# Altium footprint library Header2.PcbLib: 108 footprints (part 3 of 7)
Each footprint in its own frame and in the unit in brackets; x right, y up, seen from the top. Pads: shape width x height; smd on the part's side, far side on the other; paste and mask are expansions set on the pad; w line width, h text height; cw(c..) or ccw(c..) is an arc to the next point about the centre after c.
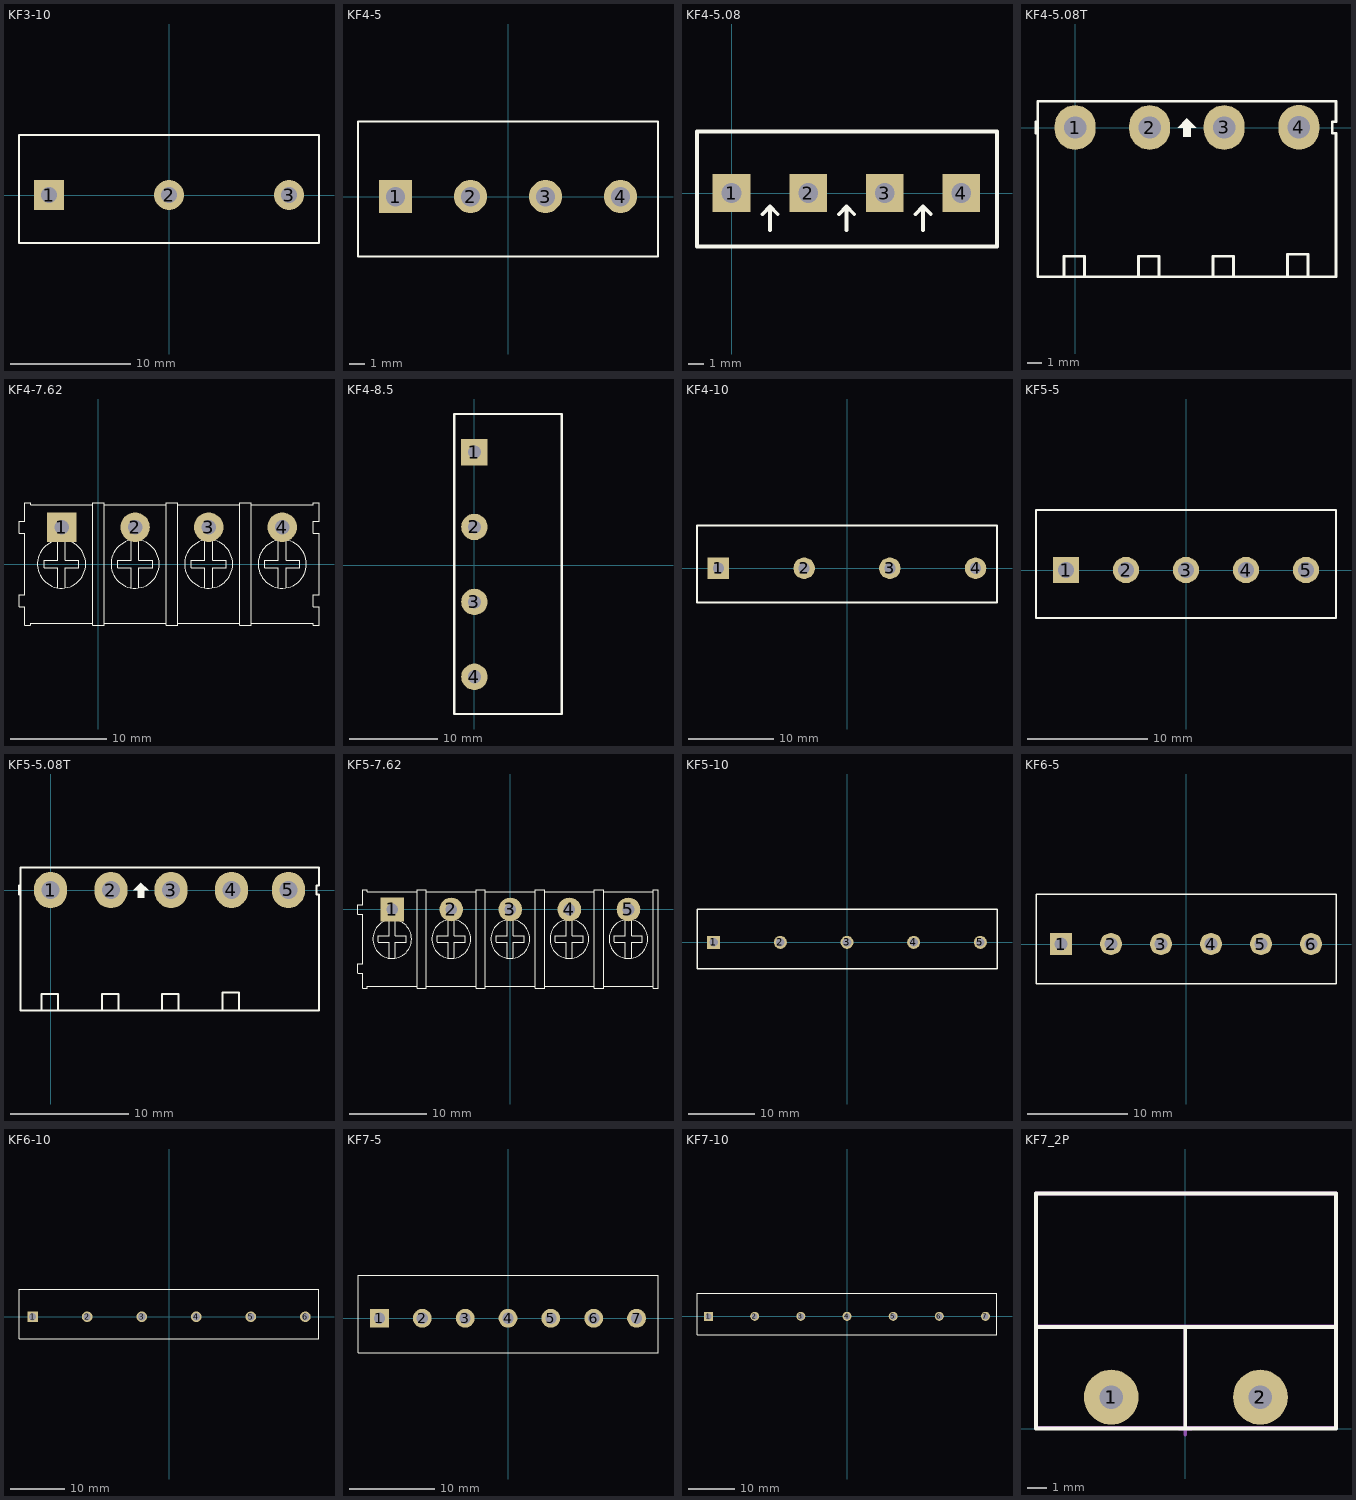
[diagram p2: the footprints below, top view; thin cyan lines are the x and y axes]

## KF3-10 [mm] "Serie 1368 - 10.00 mm _ 3 pins"
height 13
pads (3):
  rect 2.5x2.5 hole 1.3: 1(-10,0)
  round 2.5 hole 1.3: 2(0,0) 3(10,0)
Top Overlay:
  lines w0.2: -12.5,-4 12.5,-4 12.5,5 -12.5,5 -12.5,-4
3D body "691136810003.stp": height 13.1, standoff -3.9, extent -12.5,-4 12.5,5

## KF4-5 [mm] "Serie 1337 - 5.00 mm_4 pins"
height 13
pads (4):
  rect 2.2x2.2 hole 1.3: 1(-7.5,0)
  round 2.2 hole 1.3: 2(-2.5,0) 3(2.5,0) 4(7.5,0)
Top Overlay:
  lines w0.127: -10,-4 -10,5 10,5 10,-4 -10,-4
3D body "691133710004.stp": height 13, standoff -3.6, extent -10,-4 10,5

## KF4-5.08 [mm]
pads (4):
  rect 2.5x2.5 hole 1.3: 1(0,0) 2(5.08,0) 3(10.147,0) 4(15.215,0)
Top Overlay:
  lines w0.254: 2.045,-1.41 2.553,-0.902 ; 2.553,-2.464 2.553,-0.902 ; 3.061,-1.41 2.553,-0.902 ; 7.112,-1.41 7.62,-0.902 ; 7.62,-2.464 7.62,-0.902 ; 8.128,-1.41 7.62,-0.902 ; 12.179,-1.41 12.687,-0.902 ; 12.687,-2.464 12.687,-0.902 ; 13.195,-1.41 12.687,-0.902 ; -2.286,-3.531 17.577,-3.531 17.577,4.064 -2.286,4.064 -2.286,-3.531
3D body "SW3DPS-HDR1x4-MED-GREEN.STEP": height 10, standoff -4, extent -2.362,-3.429 17.638,4.071

## KF4-5.08T [mil] "Header 4, 4 pin, hight 300mil, Pin to Pin 200, Colour Green"
height 300
pads (4):
  oval 110x120 hole 60: 1(0,0) 2(200,0) 3(400.06,0.06) 4(600.39,0.39)
Top Overlay:
  region: 300,25 275,0 290,0 290,-25 310,-25 310,0 325,0
  lines w7: -105,-15 -105,15 ; -30,-400 -30,-345 25,-345 25,-400 ; 170,-400 170,-345 225,-345 225,-400 ; 370,-400 370,-345 425,-345 425,-400 ; 570,-395 570,-340 625,-340 625,-395 ; -100,-400 -100,70 700,70 700,15 690,15 690,-15 700,-15 700,-400 -100,-400
3D body "User Library-BigHeader 5EHDR_1P.step": height 334.11, standoff -156.88, extent -86.85,-406.22 110,66.22
3D body "User Library-BigHeader 5EHDR_1P.step": height 334.11, standoff -156.88, extent 300,-406.22 496.85,66.22
3D body "User Library-BigHeader 5EHDR_1P.step": height 334.11, standoff -156.88, extent 493.15,-406.22 690,66.22
3D body "User Library-BigHeader 5EHDR_1P.step": height 334.11, standoff -156.88, extent 110,-406.22 306.85,66.22

## KF4-7.62 [mil]
pads (4):
  rect 120x120 hole 59.06 unplated: 1(-150,150)
  round 120 hole 59.06 unplated: 2(150,150) 3(450,150) 4(750,150)
Top Overlay:
  circle w4: c150,0 r98.43
  circle w4: c-150,0 r98.43
  circle w4: c450,0 r98.43
  circle w4: c750,0 r98.43
  lines w4: -323.62,-173.62 -323.62,-126.38 -300,-126.38 -300,126.38 -323.62,126.38 -323.62,173.62 ; -323,-173.62 -300,-173.62 -300,-250 -277,-250 ; -323,173.62 -300,173.62 -300,250 -277,250 ; -276.38,-250 -276.38,-241 -23.62,-241 -23.62,-250 23.62,-250 23.62,-241 276.38,-241 276.38,-250 323.62,-250 323.62,-241 576.38,-241 576.38,-250 623.62,-250 623.62,-241 876.38,-241 ; -276.38,250 -276.38,241 -23.62,241 -23.62,250 23.62,250 23.62,241 276.38,241 276.38,250 323.62,250 323.62,241 576.38,241 576.38,250 623.62,250 623.62,241 876.38,241 ; -221,-15.75 -165.75,-15.75 ; -221,-15 -221,16 ; -221,15.75 -165.75,15.75 ; -165.75,-97 -165.75,-16 ; -165.75,16 -165.75,97 ; -134.25,-97 -134.25,-16 ; -134.25,-15.75 -79,-15.75 ; -134.25,15.75 -79,15.75 ; -134.25,16 -134.25,97 ; -79,-15 -79,16 ; -23.62,-244 -23.62,245 ; 23.62,-244 23.62,245 ; 79,-15.75 134.25,-15.75 ; 79,-15 79,16 ; 79,15.75 134.25,15.75 ; 134.25,-97 134.25,-16 ; 134.25,16 134.25,97 ; 165.75,-97 165.75,-16 ; 165.75,-15.75 221,-15.75 ; 165.75,15.75 221,15.75 ; 165.75,16 165.75,97 ; 221,-15 221,16 ; 276.38,-244 276.38,245 ; 276.38,-173.62 276.38,-126.38 ; 276.38,126.38 276.38,173.62 ; 277,-241 277,-250 300,-250 ; 277,241 277,250 300,250 ; 323.62,-244 323.62,245 ; 379,-15.75 434.25,-15.75 ; 379,-15 379,16 ; 379,15.75 434.25,15.75 ; 434.25,-97 434.25,-16 ; 434.25,16 434.25,97 ; 465.75,-97 465.75,-16 ; 465.75,-15.75 521,-15.75 ; 465.75,15.75 521,15.75 ; 465.75,16 465.75,97 ; 521,-15 521,16 ; 576.38,-244 576.38,245 ; 623.62,-244 623.62,245 ; 679,-15.75 734.25,-15.75 ; 679,-15 679,16 ; 679,15.75 734.25,15.75 ; 734.25,-97 734.25,-16 ; 734.25,16 734.25,97 ; 765.75,-97 765.75,-16 ; 765.75,-15.75 821,-15.75 ; 765.75,15.75 821,15.75 ; 765.75,16 765.75,97 ; 821,-15 821,16 ; 876.38,-173.62 876.38,-126.38 900,-126.38 900,126.38 876.38,126.38 876.38,173.62 ; 877,-241 877,-250 900,-250 900,-173.62 877,-173.62 ; 877,173.62 900,173.62 900,250 877,250 877,241 ; 577,-250 577,-241 577,-250 ; 577,-250 600,-250 577,-250 ; 577,250 600,250 577,250 ; 577,250 577,241 577,250 ; 576.38,-173.62 576.38,-126.38 576.38,-173.62 ; 576.38,126.38 576.38,173.62 576.38,126.38
3D body "691313410004.stp": height 336.61, standoff -155.51, extent -300,-246.22 900,226.22

## KF4-8.5 [mm]
pads (4):
  rect 3x3 hole 1.5: 1(0,12.827)
  round 3 hole 1.5: 2(0,4.327) 3(0,-4.173) 4(0,-12.673)
Top Overlay:
  lines w0.254: -2.286,-16.891 -2.286,17.145 9.906,17.145 9.906,-16.891 -2.286,-16.891
3D body "User Library-KF8500-4P.STEP": height 12.4, standoff -3.85, extent -2.159,-16.873 9.841,17.127

## KF4-10 [mm] "Serie 1368 - 10.00 mm _ 4 pins"
height 13
pads (4):
  rect 2.5x2.5 hole 1.3: 1(-15,0)
  round 2.5 hole 1.3: 2(-5,0) 3(5,0) 4(15,0)
Top Overlay:
  lines w0.2: -17.5,-4 17.5,-4 17.5,5 -17.5,5 -17.5,-4
3D body "691136810004.stp": height 13.1, standoff -3.9, extent -17.5,-4 17.5,5

## KF5-5 [mm] "Serie 1337 - 5.00 mm_5 pins"
height 13
pads (5):
  rect 2.2x2.2 hole 1.3: 1(-10,0)
  round 2.2 hole 1.3: 2(-5,0) 3(0,0) 4(5,0) 5(10,0)
Top Overlay:
  lines w0.127: -12.5,-4 -12.5,5 12.5,5 12.5,-4 -12.5,-4
3D body "691133710005.stp": height 13, standoff -3.6, extent -12.5,-4 12.5,5

## KF5-5.08T [mil]
pads (5):
  oval 110x120 hole 60: 1(0,0) 2(200,0) 3(400.06,0.06) 4(600.39,0.39) 5(789.39,0.39)
Top Overlay:
  region: 300,25 275,0 290,0 290,-25 310,-25 310,0 325,0
  lines w7: -105,-15 -105,15 ; -30,-400 -30,-345 25,-345 25,-400 ; 170,-400 170,-345 225,-345 225,-400 ; 370,-400 370,-345 425,-345 425,-400 ; 570,-395 570,-340 625,-340 625,-395 ; -100,-400 -100,75 891,75 891,15 883,15 883,-15 891,-15 891,-400 -100,-400
3D body "User Library-BigHeader 5EHDR_1P.step": height 158.08, standoff -332.91, extent -95,-402.44 101.85,70
3D body "User Library-BigHeader 5EHDR_1P.step": height 158.08, standoff -332.91, extent 295,-401.22 491.85,71.22
3D body "User Library-BigHeader 5EHDR_1P.step": height 158.08, standoff -332.91, extent 100,-401.22 296.85,71.22
3D body "User Library-BigHeader 5EHDR_1P.step": height 158.08, standoff -332.91, extent 490,-401.22 686.85,71.22
3D body "User Library-BigHeader 5EHDR_1P.step": height 158.08, standoff -332.91, extent 685,-401.22 881.85,71.22

## KF5-7.62 [mil]
pads (5):
  rect 120x120 hole 59.06 unplated: 1(-600,0)
  round 120 hole 59.06 unplated: 2(-300,0) 3(0,0) 4(300,0) 5(600,0)
Top Overlay:
  drawing of 152 lines, arcs and shapes, not listed
3D body "691313410005.stp": height 336.61, standoff -155.51, extent -750,-392.44 750,80

## KF5-10 [mm] "Serie 1368 - 10.00 mm _ 5 pins"
height 13
pads (5):
  rect 1.95x1.95 hole 1.3: 1(-20,0)
  round 1.95 hole 1.3: 2(-10,0) 3(0,0) 4(10,0) 5(20,0)
Top Overlay:
  lines w0.2: -22.5,-4 -22.5,5 22.5,5 22.5,-4 -22.5,-4
3D body "691136810005.stp": height 13.1, standoff -3.9, extent -22.5,-4 22.5,5

## KF6-5 [mm] "Serie 1337 - 5.00 mm_6 pins"
height 13
pads (6):
  rect 2.2x2.2 hole 1.3: 1(-12.5,0)
  round 2.2 hole 1.3: 2(-7.5,0) 3(-2.5,0) 4(2.5,0) 5(7.5,0) 6(12.5,0)
Top Overlay:
  lines w0.127: -15,-4 15,-4 15,5 -15,5 -15,-4
3D body "691133710006.stp": height 13, standoff -3.6, extent -15,-4 15,5

## KF6-10 [mm] "Serie 1368 - 10.00 mm _ 6 pins"
height 13
pads (6):
  rect 1.95x1.95 hole 1.3: 1(-25,0)
  round 1.95 hole 1.3: 2(-15,0) 3(-5,0) 4(5,0) 5(15,0) 6(25,0)
Top Overlay:
  lines w0.2: -27.5,-4 27.5,-4 27.5,5 -27.5,5 -27.5,-4
3D body "691136810006.stp": height 13.1, standoff -3.9, extent -27.5,-4 27.5,5

## KF7-5 [mm] "Serie 1337 - 5.00 mm_7 pins"
height 13
pads (7):
  rect 2.2x2.2 hole 1.3: 1(-15,0)
  round 2.2 hole 1.3: 2(-10,0) 3(-5,0) 4(0,0) 5(5,0) 6(10,0) 7(15,0)
Top Overlay:
  lines w0.127: -17.5,-4 17.5,-4 17.5,5 -17.5,5 -17.5,-4
3D body "691133710007.stp": height 13, standoff -3.6, extent -17.5,-4 17.5,5

## KF7-10 [mm] "Serie 1368 - 10.00 mm _ 7 pins"
height 13
pads (7):
  rect 1.95x1.95 hole 1.3: 1(-30,0)
  round 1.95 hole 1.3: 2(-20,0) 3(-10,0) 4(0,0) 5(10,0) 6(20,0) 7(30,0)
Top Overlay:
  lines w0.2: -32.5,-4 32.5,-4 32.5,5 -32.5,5 -32.5,-4
3D body "691136810007.stp": height 13.1, standoff -3.9, extent -32.5,-4 32.5,5

## KF7_2P [mm]
pads (8):
  round 2.794 hole 1.2: 1(-3.78,1.6) 1(-3.78,1.6) 1(-3.78,1.615) 1(-3.78,1.615) 2(3.84,1.6) 2(3.84,1.6) 2(3.84,1.615) 2(3.84,1.615)
Top Overlay:
  lines w0.2: -7.62,5.2 7.62,5.2 ; 0,0.015 0,5.19 ; -7.62,0.015 7.7,0.015 7.7,12 -7.62,12 -7.62,0.015
Mechanical 13:
  lines w0.2: -7.62,5.21 7.62,5.21 ; 0,0.025 0,5.2 ; -7.62,0.025 -7.62,12.01 7.7,12.01 7.7,0.025 -7.62,0.025
  text "'.Designator'" at -3.6,10.1 h0.7
Mechanical 15:
  lines w0.2: -0.3,0 0.285,0 ; 0,-0.3 0,0.3
3D body "User Library-kf7_62-2p.step": height 12.9, standoff -5.8, extent -7.62,0.015 7.62,12.015
3D body "User Library-kf7_62-2p.step": height 12.9, standoff -5.8, extent -7.62,0.015 7.62,12.015